# Altium footprint library MAJ library.PcbLib: 43 footprints (part 3 of 3)
Each footprint in its own frame and in the unit in brackets; x right, y up, seen from the top. Pads: shape width x height; smd on the part's side, far side on the other; paste and mask are expansions set on the pad; w line width, h text height; cw(c..) or ccw(c..) is an arc to the next point about the centre after c.
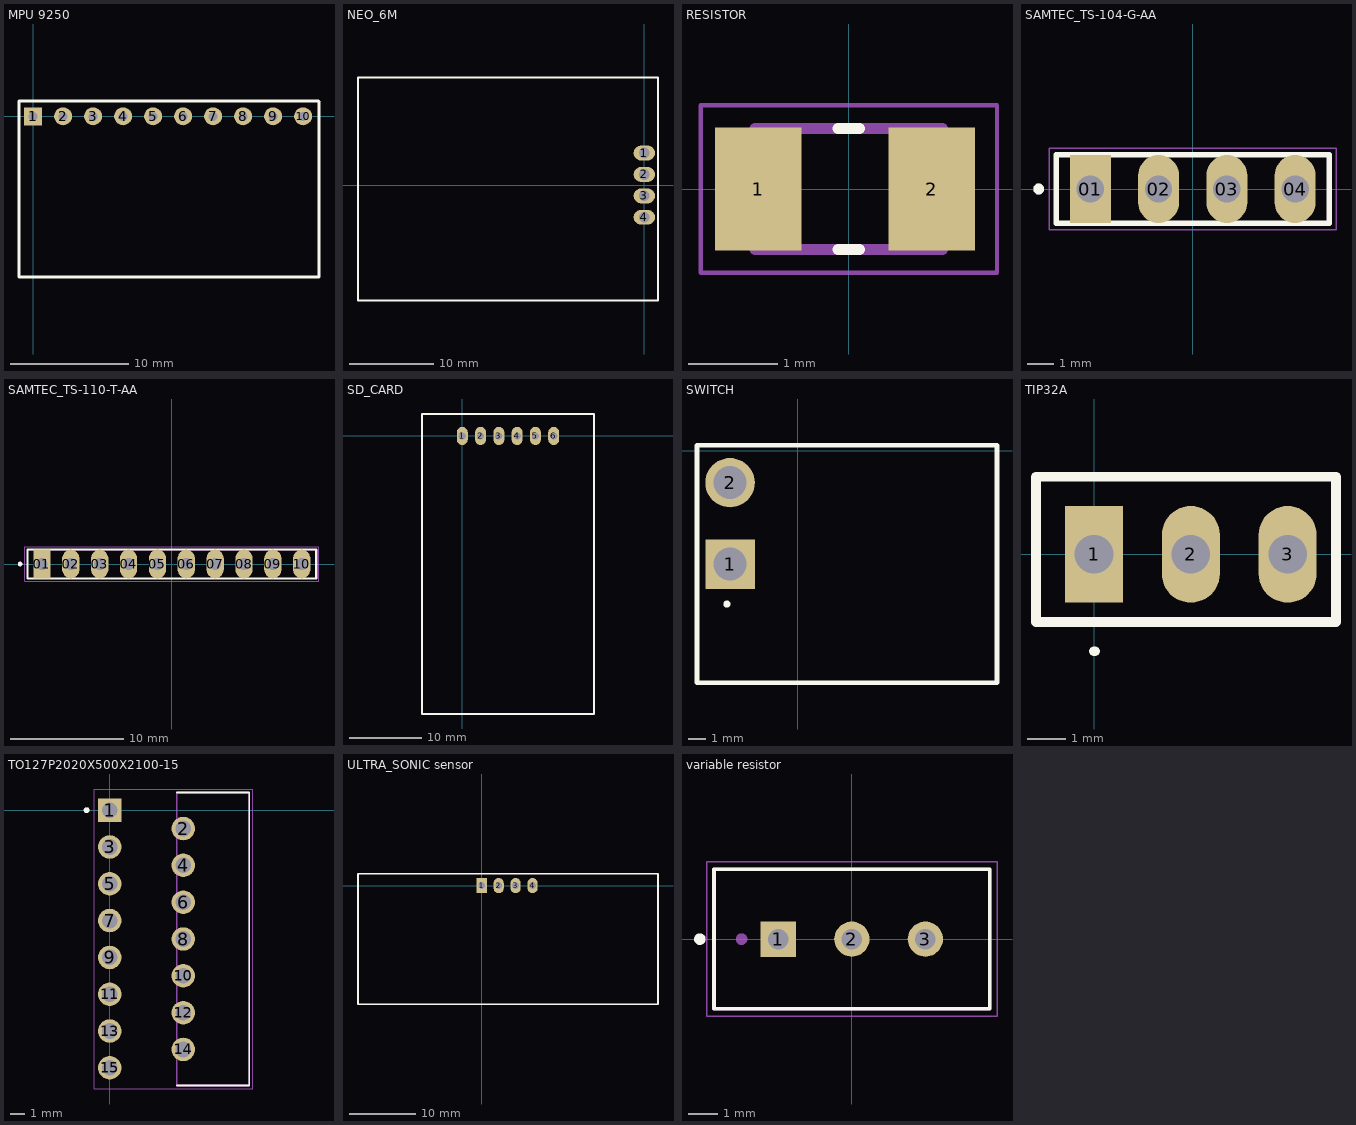
[diagram p2: the footprints below, top view; thin cyan lines are the x and y axes]

## MPU 9250 [mil]
pads (11):
  rect 60x60 hole 30: 1(0,0)
  round 60 hole 30: 1(0,0) 2(100,0) 3(200,0) 4(300,0) 5(400,0) 6(500,0) 7(600,0) 8(700,0) 9(800,0) 10(900,0)
Top Overlay:
  lines w10: 951.66,51 -47,51 -47,-466 -47,-535.58 -46.9,-535.68 952.96,-535.68 952.96,49.7
Mechanical 1:
  lines w10: 951.66,51 952.96,49.7
3D body "MPU-9250.stp": height 129.28, standoff -373.69, extent -47.67,-539.55 952.33,51

## NEO_6M [mil]
pads (4):
  oval 100x70 hole 50: 1(0,150) 2(0,50) 3(0,-50) 4(0,-150)
Top Overlay:
  lines w10: -1338.52,-539.73 63.69,-539.73 63.69,503.82 -1338.52,503.82 -1338.52,-539.73
3D body "NEO-6M.STEP": height 392.82, standoff -77.18, extent -1340,-537.01 60,500

## RESISTOR [mm]
pads (2):
  rect 0.97x1.38 smd: 1(-1.016,0) 2(0.93,0)
Top Overlay:
  lines w0.127: -0.12,-0.68 0.12,-0.68 ; -0.12,0.68 0.12,0.68
Mechanical 1:
  text "'.Designator" at -8.865,-0.407 h1.52
Mechanical 13:
  lines w0.127: -1.05,-0.68 1.05,-0.68 1.05,0.68 -1.05,0.68 -1.05,-0.68
Mechanical 15:
  lines w0.05: -1.665,-0.94 1.665,-0.94 1.665,0.94 -1.665,0.94 -1.665,-0.94
3D body "User Library-CR2012-0805 (1).step": height 0.61, standoff 0.01, extent -1.016,-0.625 0.984,0.625

## SAMTEC_TS-104-G-AA [mil]
pads (4):
  rect 60x100 hole 40: 01(-150,0)
  oval 60x100 hole 40: 02(-50,0) 03(50,0) 04(150,0)
Top Overlay:
  circle w7.87: c-225.59,0 r3.94
  lines w7.87: -200,-50 -200,50 200,50 200,-50 -200,-50
Mechanical 13:
  circle w7.87: c-225.59,0 r3.94
  lines w3.94: -200,-50 -200,50 ; -200,-50 200,-50 ; -200,-50 -200,50 ; -200,50 200,50 ; -200,50 200,50 ; 200,-50 200,50 ; 200,-50 200,50
Mechanical 15:
  lines w1.97: -209.84,-59.84 -209.84,59.84 209.84,59.84 209.84,-59.84 -209.84,-59.84
3D body "TS-104-G-AA.stp": height 311, standoff -166, extent -205,-50 203,50

## SAMTEC_TS-110-T-AA [mil]
pads (10):
  rect 60x100 / inner round 38.78 / far side rect 38.78x38.78 hole 40: 01(-450,0)
  oval 60x100 hole 40: 02(-350,0) 03(-250,0) 04(-150,0) 05(-50,0) 06(50,0) 07(150,0) 08(250,0) 09(350,0) 10(450,0)
Top Overlay:
  circle w7.87: c-525.59,0 r3.94
  lines w7.87: -500,-50 -500,50 500,50 500,-50 -500,-50
Mechanical 13:
  circle w7.87: c-525.59,0 r3.94
  lines w3.94: -500,-50 -500,50 ; -500,-50 500,-50 ; -500,-50 -500,50 ; -500,50 500,50 ; -500,50 500,50 ; 500,-50 500,50 ; 500,-50 500,50
Mechanical 15:
  lines w1.97: -509.84,-59.84 -509.84,59.84 509.84,59.84 509.84,-59.84 -509.84,-59.84
3D body "TS-110-T-AA.stp": height 311.5, standoff -165.5, extent -503.99,-49.99 504.01,50.01

## SD_CARD [mil]
pads (6):
  oval 60x100 hole 40: 1(0,0) 2(100,0) 3(200,0) 4(300,0) 5(400,0) 6(500,0)
Top Overlay:
  lines w10: -220,-1520 -220,120 720,120 720,-1510 720,-1520 710,-1520 -220,-1520
3D body "Product_TF Micro SD Card Memory Modul Arduino.STEP": height 122.05, standoff -329.15, extent -222.44,-1520 722.44,125.67

## SWITCH [mm]
height 18.41
pads (2):
  rect 2.775x2.775 / inner round 2.775 / far side rect 2.775x2.775 hole 1.85: 1(-3.81,-6.35)
  round 2.775 hole 1.85: 2(-3.81,-1.778)
Top Overlay:
  circle w0.2: c-3.988,-8.585 r0.1
  lines w0.254: -5.664,-13.007 11.161,-13.007 11.161,0.33 -5.664,0.33 -5.664,-13.007
3D body "1101M2S3ABE2.stp": height 4.09, standoff -5.84, extent -4.496,-13.132 11.278,0.432

## TIP32A [mil]
pads (3):
  rect 60x100 hole 40: 1(0,0)
  oval 60x100 hole 40: 2(100,0) 3(200,0)
Top Overlay:
  lines w10: 0,-100 1,-100 ; -60,-70 250,-70 250,80 -60,80 -60,0 -60,-70
3D body "TO-220_STM.step": height 775.98, standoff -255, extent -110,-110 300,71.02

## TO127P2020X500X2100-15 [mm]
pads (15):
  rect 1.62x1.62 hole 1.08: 1(0,0)
  round 1.62 hole 1.08: 2(5.08,-1.27) 3(0,-2.54) 4(5.08,-3.81) 5(0,-5.08) 6(5.08,-6.35) 7(0,-7.62) 8(5.08,-8.89) 9(0,-10.16) 10(5.08,-11.43) 11(0,-12.7) 12(5.08,-13.97) 13(0,-15.24) 14(5.08,-16.51) 15(0,-17.78)
Top Overlay:
  circle w0.2: c-1.59,0 r0.1
  lines w0.127: 4.63,-18.99 9.63,-18.99 9.63,1.21 4.63,1.21
Mechanical 13:
  circle w0.2: c-1.59,0 r0.1
  lines w0.127: 4.63,-18.99 9.63,-18.99 9.63,1.21 4.63,1.21 4.63,-18.99
Mechanical 15:
  lines w0.05: -1.06,-19.24 9.88,-19.24 9.88,1.46 -1.06,1.46 -1.06,-19.24

## ULTRA_SONIC sensor [mil]
pads (4):
  rect 60x90 hole 40: 1(0,0)
  oval 60x90 hole 40: 2(100,0) 3(200,0) 4(300,0)
Top Overlay:
  lines w10: -730,-700 1040,-700 1040,70 -730,70 -730,-700
3D body "HC-SR04 (1).stp": height 799.21, standoff -225.79, extent -732.83,-700 1038.83,18.61

## variable resistor [mm]
pads (3):
  rect 1.218x1.218 hole 0.71: 1(-2.54,0)
  round 1.218 hole 0.71: 2(0,0) 3(2.54,0)
Top Overlay:
  circle w0.2: c-5.25,0 r0.1
  lines w0.127: -4.765,-2.41 4.765,-2.41 4.765,2.42 -4.765,2.42 -4.765,-2.41
Mechanical 13:
  circle w0.2: c-3.81,0 r0.1
  lines w0.127: -4.765,-2.41 -4.765,2.42 4.765,2.42 4.765,-2.41 -4.765,-2.41
Mechanical 15:
  lines w0.05: -5.015,-2.66 -5.015,2.67 5.015,2.67 5.015,-2.66 -5.015,-2.66